# Altium footprint library L5.PcbLib: 1 footprints
Each footprint in its own frame and in the unit in brackets; x right, y up, seen from the top. Pads: shape width x height; smd on the part's side, far side on the other; paste and mask are expansions set on the pad; w line width, h text height; cw(c..) or ccw(c..) is an arc to the next point about the centre after c.
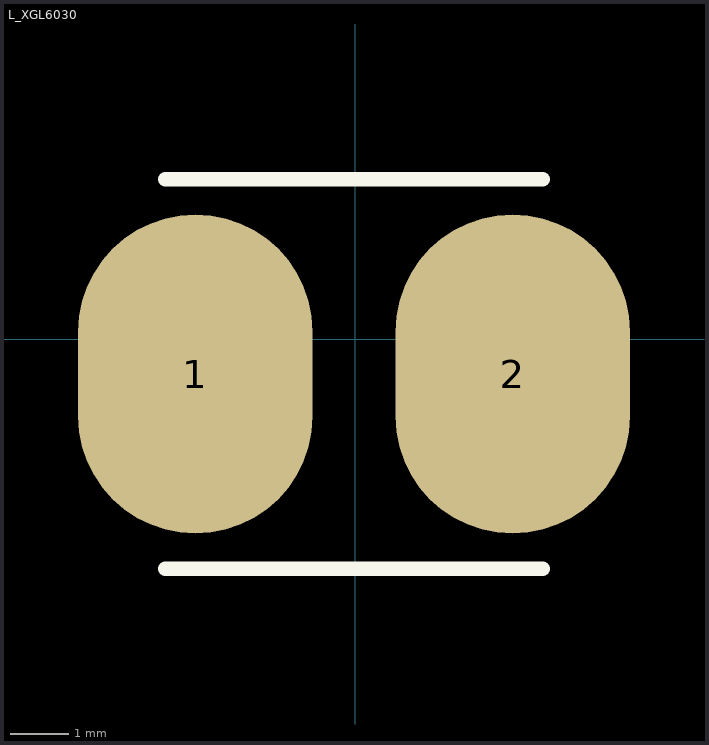
[diagram p0: the footprint, top view; thin cyan lines are the x and y axes]

## L_XGL6030 [mm]
pads (2):
  oval 4.04x5.5 smd: 1(-2.755,-0.6) 2(2.715,-0.6)
Top Overlay:
  lines w0.254: -3.275,-3.955 3.235,-3.955 ; -3.275,2.755 3.235,2.755